# Altium schematic symbol library TPS22919DCKR.SchLib: 1 symbol
Pins are listed as number, name and electrical type; pins without a type are passive.

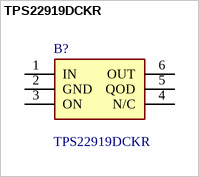
[diagram p0: symbol TPS22919DCKR]

## TPS22919DCKR
designator B?
5.5V, 1.5A, 90m self-protected load switch with controlled rise time; Manufacturer_Name: Texas Instruments; Geometry.Height: 1.1mm; Mouser Part Number: 595-TPS22919DCKR; Mouser Price/Stock: https://www.mouser.co.uk/ProductDetail/Texas-Instruments/TPS22919DCKR?qs=byeeYqUIh0P8WJZpeizUqw%3D%3D; Manufacturer_Part_Number: TPS22919DCKR; Datasheet Link: http://www.ti.com/lit/ds/symlink/tps22919.pdf
footprint SOT65P210X110-6N
pins: 1 IN, 2 GND, 3 ON, 4 N/C, 5 QOD, 6 OUT